# Altium footprint library CANable.PcbLib: 23 footprints (part 1 of 2)
Each footprint in its own frame and in the unit in brackets; x right, y up, seen from the top. Pads: shape width x height; smd on the part's side, far side on the other; paste and mask are expansions set on the pad; w line width, h text height; cw(c..) or ccw(c..) is an arc to the next point about the centre after c.
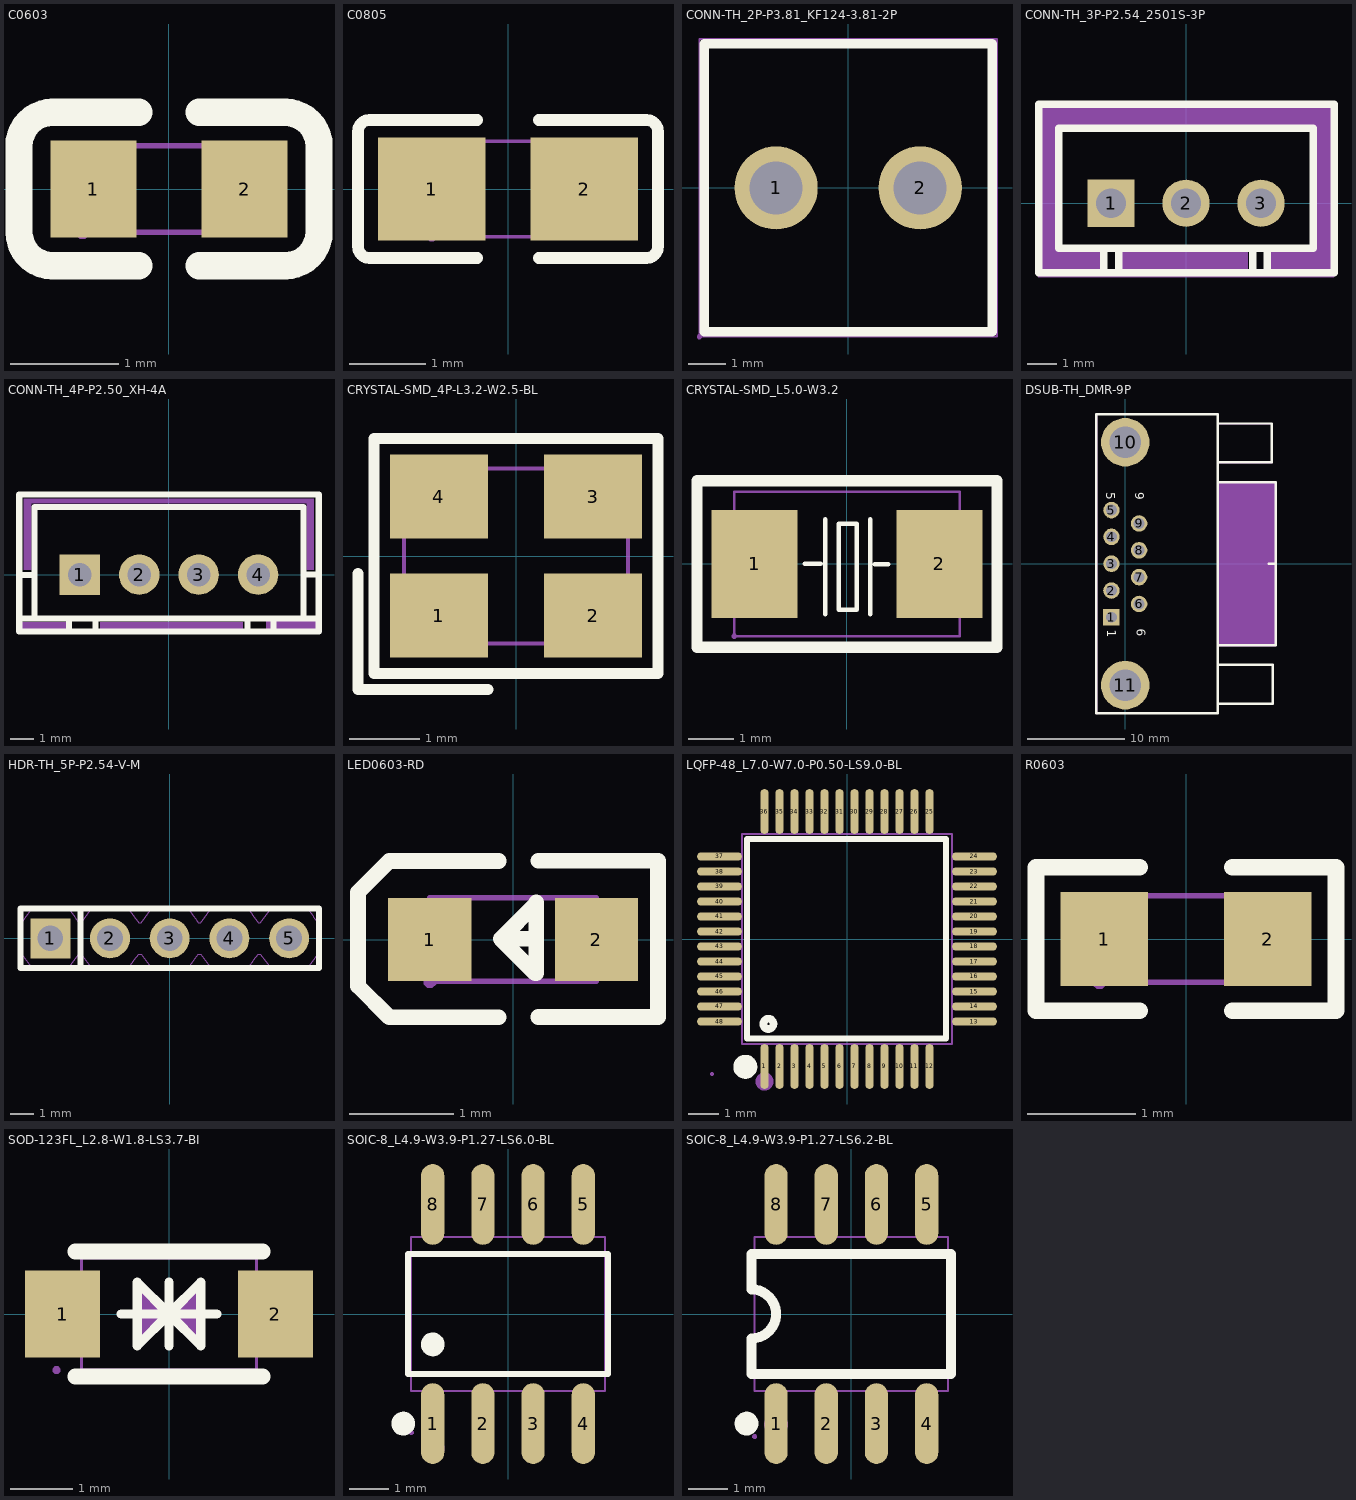
[diagram p0: the footprints below, top view; thin cyan lines are the x and y axes]

## C0603 [mm]
pads (2):
  rect 0.8x0.9 smd: 1(-0.7,0) 2(0.7,0)
Top Overlay:
  lines w0.254: -1.08,-0.71 -0.28,-0.71 ; -1.08,0.71 -0.28,0.71 ; -1.08,-0.71 cw(c-1.08,-0.4) -1.39,-0.4 -1.39,0.4 cw(c-1.08,0.4) -1.08,0.71 ; 0.28,-0.71 1.08,-0.71 ccw(c1.08,-0.4) 1.39,-0.4 1.39,0.4 ccw(c1.08,0.4) 1.08,0.71 0.28,0.71
Mechanical 15:
  region: 0.8,-0.4 0.8,0.4 0.5,0.4 0.5,-0.4
  region: -0.8,-0.4 -0.8,0.4 -0.5,0.4 -0.5,-0.4
  region: -0.74,-0.4 -0.74,-0.425 -0.775,-0.46 -0.825,-0.46 -0.86,-0.425 -0.86,-0.4 -0.86,-0.375 -0.825,-0.34 -0.775,-0.34 -0.74,-0.375
  lines w0.051: -0.8,-0.4 0.8,-0.4 0.8,0.4 -0.8,0.4 -0.8,-0.4

## C0805 [mm]
pads (2):
  rect 1.41x1.35 smd paste-100 mask+0.051: 1(-1,0) 2(1,0)
Top Overlay:
  lines w0.152: -0.401,-0.904 -1.811,-0.904 cw(c-1.811,-0.751) -1.964,-0.751 -1.964,0.751 cw(c-1.811,0.751) -1.811,0.904 -0.401,0.904 ; 0.401,-0.904 1.811,-0.904 ccw(c1.811,-0.751) 1.964,-0.751 1.964,0.751 ccw(c1.811,0.751) 1.811,0.904 0.401,0.904
Top Paste:
  region: 1.705,0.64 1.705,-0.64 1.655,-0.69 0.505,-0.69 0.455,-0.64 0.45,-0.23 0.9,-0.23 0.9,0.22 0.46,0.22 0.455,0.64 0.505,0.69 1.655,0.69
  region: -1.705,-0.64 -1.705,0.64 -1.655,0.69 -0.505,0.69 -0.455,0.64 -0.45,0.23 -0.9,0.23 -0.9,-0.22 -0.46,-0.22 -0.455,-0.64 -0.505,-0.69 -1.655,-0.69
Mechanical 15:
  region: 1,0.625 1,-0.625 0.5,-0.625 0.5,0.625
  region: -1,-0.625 -1,0.625 -0.5,0.625 -0.5,-0.625
  region: -0.94,-0.625 -0.94,-0.65 -0.975,-0.685 -1.025,-0.685 -1.06,-0.65 -1.06,-0.625 -1.06,-0.6 -1.025,-0.565 -0.975,-0.565 -0.94,-0.6
  lines w0.051: -1,-0.625 1,-0.625 1,0.625 -1,0.625 -1,-0.625

## CONN-TH_2P-P3.81_KF124-3.81-2P [mm]
pads (2):
  round 2.2 hole 1.4: 1(-1.905,0) 2(1.905,0)
Top Overlay:
  lines w0.254: -3.81,-3.81 3.81,-3.81 3.81,3.81 -3.81,3.81 -3.81,-3.81
Mechanical 15:
  region: -3.877,-3.937 -3.877,-3.962 -3.912,-3.997 -3.962,-3.997 -3.997,-3.962 -3.997,-3.937 -3.997,-3.912 -3.962,-3.877 -3.912,-3.877 -3.877,-3.912
  region: -1.305,0 -1.305,-0.119 -1.396,-0.34 -1.565,-0.509 -1.786,-0.6 -2.024,-0.6 -2.245,-0.509 -2.414,-0.34 -2.505,-0.119 -2.505,0 -2.505,0.119 -2.414,0.34 -2.245,0.509 -2.024,0.6 -1.786,0.6 -1.565,0.509 -1.396,0.34 -1.305,0.119
  region: 2.505,0 2.505,-0.119 2.414,-0.34 2.245,-0.509 2.024,-0.6 1.786,-0.6 1.565,-0.509 1.396,-0.34 1.305,-0.119 1.305,0 1.305,0.119 1.396,0.34 1.565,0.509 1.786,0.6 2.024,0.6 2.245,0.509 2.414,0.34 2.505,0.119
  lines w0.051: -3.937,-3.937 -3.937,3.937 3.937,3.937 3.937,-3.937 -3.937,-3.937

## CONN-TH_3P-P2.54_2501S-3P [mm]
pads (3):
  rect 1.6x1.6 hole 1: 1(-2.54,0)
  round 1.6 hole 1: 2(0,0) 3(2.54,0)
Top Overlay:
  lines w0.254: -2.794,-2.35 -2.794,-1.524 ; -2.279,-2.35 -2.279,-1.524 ; 2.268,-2.35 2.268,-1.524 ; 2.751,-2.35 2.751,-1.524 ; -4.98,-2.35 -4.98,3.35 5.02,3.35 5.02,-2.35 -4.98,-2.35 ; -4.318,-1.524 4.318,-1.524 4.318,2.54 -4.318,2.54 -4.318,-1.524
Mechanical 6:
  region: -2.22,-2.3 2.098,-2.3 2.098,-1.538 -2.22,-1.538
  region: 2.794,-2.286 2.794,-1.524 4.318,-1.524 4.318,2.54 -4.318,2.54 -4.318,-1.524 -2.794,-1.524 -2.794,-2.286 -5.08,-2.286 -5.08,3.302 5.08,3.302 5.08,-2.286
Mechanical 15:
  region: 2.215,0.325 2.865,0.325 2.865,-0.325 2.215,-0.325
  region: -0.325,0.325 0.325,0.325 0.325,-0.325 -0.325,-0.325
  region: -2.865,0.325 -2.215,0.325 -2.215,-0.325 -2.865,-0.325
  region: -4.94,3.4 -4.94,3.375 -4.975,3.34 -5.025,3.34 -5.06,3.375 -5.06,3.4 -5.06,3.425 -5.025,3.46 -4.975,3.46 -4.94,3.425
  lines w0.051: -5,-2.5 -5,3.4 5,3.4 5,-2.5 -5,-2.5

## CONN-TH_4P-P2.50_XH-4A [mm]
pads (4):
  rect 1.7x1.7 hole 1: 1(-3.75,0)
  round 1.7 hole 1: 2(-1.25,0) 3(1.25,0) 4(3.75,0)
Top Overlay:
  lines w0.254: -6.3,-1.815 -6.265,-1.85 -6.011,-1.85 -5.7,-1.85 ; -6.3,-0.007 -5.7,-0.007 ; -4.2,-2.4 -4.2,-1.9 ; -3.1,-2.4 -3.1,-1.9 ; 3.301,-2.4 3.301,-1.9 ; 4.401,-2.4 4.401,-1.9 ; 5.7,0 6.3,0 ; 5.711,-1.815 5.745,-1.85 6.311,-1.85 ; -6.3,-2.4 6.3,-2.4 6.3,3.378 -6.163,3.378 -6.3,3.378 -6.3,-2.4 ; -5.65,-1.85 -5.65,2.85 5.65,2.85 5.65,-1.85 -5.65,-1.85
Mechanical 6:
  region: 4.092,-1.916 6.192,-1.916 6.192,-2.316 4.092,-2.316
  region: -6.3,-2 -4.2,-2 -4.2,-2.4 -6.3,-2.4
  region: -2.9,-2 3.1,-2 3.1,-2.4 -2.9,-2.4
  region: -6.1,0.2 -5.8,0.2 -5.8,3 5.8,3 5.8,0.2 6.1,0.2 6.1,3.2 -6.1,3.2
Mechanical 15:
  region: -4.07,0.32 -3.43,0.32 -3.43,-0.32 -4.07,-0.32
  region: -1.57,0.32 -0.93,0.32 -0.93,-0.32 -1.57,-0.32
  region: 0.93,0.32 1.57,0.32 1.57,-0.32 0.93,-0.32
  region: 3.43,0.32 4.07,0.32 4.07,-0.32 3.43,-0.32
  region: -6.19,-2.422 -6.19,-2.447 -6.225,-2.482 -6.275,-2.482 -6.31,-2.447 -6.31,-2.422 -6.31,-2.397 -6.275,-2.362 -6.225,-2.362 -6.19,-2.397
  lines w0.051: -6.25,-2.422 6.25,-2.422 6.25,3.378 -6.25,3.378 -6.25,-2.422

## CRYSTAL-SMD_4P-L3.2-W2.5-BL [mm]
pads (4):
  rect 1.4x1.2 smd: 1(-1.1,-0.85) 2(1.1,-0.85) 3(1.1,0.85) 4(-1.1,0.85)
Top Overlay:
  lines w0.152: -2.257,-0.25 -2.257,-1.907 -0.4,-1.907 ; -2.029,-1.678 2.029,-1.678 2.029,1.679 -2.029,1.679 -2.029,-1.678
Mechanical 6:
  circle w0.254: c-1.27,-0.889 r0.127
Mechanical 15:
  region: -1.5,-0.35 -0.6,-0.35 -0.6,-1.15 -1.5,-1.15
  region: 0.6,-0.35 1.5,-0.35 1.5,-1.15 0.6,-1.15
  region: 0.6,1.15 1.5,1.15 1.5,0.35 0.6,0.35
  region: -1.5,1.15 -0.6,1.15 -0.6,0.35 -1.5,0.35
  region: -1.54,-1.25 -1.54,-1.275 -1.575,-1.31 -1.625,-1.31 -1.66,-1.275 -1.66,-1.25 -1.66,-1.225 -1.625,-1.19 -1.575,-1.19 -1.54,-1.225
  lines w0.051: -1.6,-1.25 1.6,-1.25 1.6,1.25 -1.6,1.25 -1.6,-1.25

## CRYSTAL-SMD_L5.0-W3.2 [mm]
pads (2):
  rect 1.9x2.4 smd: 1(-2.05,0) 2(2.05,0)
Top Overlay:
  lines w0.1: -0.94,0 -0.584,0 ; -0.483,-1.109 -0.483,0.991 ; 0.517,-1.109 0.517,0.991 ; 0.617,-0.009 0.917,-0.009 ; -0.183,-1.009 -0.183,0.89 0.217,0.89 0.217,-1.009 -0.183,-1.009
  lines w0.254: -3.325,-1.85 3.325,-1.85 3.325,-0.7 3.325,0.7 3.325,1.85 -3.325,1.85 -3.325,0.7 -3.325,-0.7 -3.325,-1.85
Mechanical 15:
  region: -2.44,-1.6 -2.44,-1.625 -2.475,-1.66 -2.525,-1.66 -2.56,-1.625 -2.56,-1.6 -2.56,-1.575 -2.525,-1.54 -2.475,-1.54 -2.44,-1.575
  region: -2.4,1 -1.3,1 -1.3,-1 -2.4,-1
  region: 1.3,1 2.4,1 2.4,-1 1.3,-1
  lines w0.051: -2.5,-1.6 -2.5,1.6 2.5,1.6 2.5,-1.6 -2.5,-1.6

## DSUB-TH_DMR-9P [mm]
pads (11):
  rect 1.7x1.7 hole 1.1: 1(-1.42,-5.52)
  round 1.7 hole 1.1: 2(-1.42,-2.76) 3(-1.42,0) 4(-1.42,2.76) 5(-1.42,5.52) 6(1.42,-4.14) 7(1.42,-1.38) 8(1.42,1.38) 9(1.42,4.14)
  round 5 hole 3.25: 10(0,12.5) 11(0,-12.5)
Top Overlay:
  lines w0.254: 9.5,-14.4 15.2,-14.4 15.2,-10.4 9.5,-10.4 ; 9.5,-8.38 15.5,-8.38 15.5,8.37 9.5,8.37 ; 9.5,10.43 15.058,10.43 ; 9.5,14.57 9.5,14.428 15.076,14.428 15.076,10.46 ; 14.78,-0.005 15.48,-0.005 ; -3,-15.4 -3,15.4 9.5,15.4 9.5,14.621 9.5,-15.4 -3,-15.4
  text "9" at 1.018,7.374 h0.89
  text "6" at 1.171,-6.698 h0.89
  text "1" at -1.877,-6.799 h0.89
  text "5" at -1.979,7.349 h0.89
Mechanical 6:
  region: 9.5,8.4 15.5,8.4 15.5,-8.4 9.5,-8.4
Mechanical 15:
  drawing of 29 lines, arcs and shapes, not listed

## HDR-TH_5P-P2.54-V-M [mm]
pads (5):
  rect 1.7x1.7 hole 1.1: 1(-5.08,0)
  round 1.7 hole 1.1: 2(-2.54,0) 3(0,0) 4(2.54,0) 5(5.08,0)
Top Overlay:
  lines w0.254: -3.786,-1.27 -3.786,1.27 ; -6.35,-1.27 6.35,-1.27 6.35,1.27 -6.35,1.27 -6.35,-1.27
Mechanical 15:
  region: -6.29,-1.271 -6.29,-1.296 -6.325,-1.331 -6.375,-1.331 -6.41,-1.296 -6.41,-1.271 -6.41,-1.246 -6.375,-1.211 -6.325,-1.211 -6.29,-1.246
  region: 4.76,0.32 5.4,0.32 5.4,-0.32 4.76,-0.32
  region: 2.22,0.32 2.86,0.32 2.86,-0.32 2.22,-0.32
  region: -0.32,0.32 0.32,0.32 0.32,-0.32 -0.32,-0.32
  region: -2.86,0.32 -2.22,0.32 -2.22,-0.32 -2.86,-0.32
  region: -5.4,0.32 -4.76,0.32 -4.76,-0.32 -5.4,-0.32
  lines w0.051: -6.35,-0.67 -6.35,0.67 -6.299,0.67 -6.028,1.032 -5.85,1.27 -4.31,1.27 -4.149,1.059 -4.048,0.925 -4.017,0.884 -3.86,0.67 -3.76,0.67 -3.31,1.27 -1.77,1.27 -1.631,1.088 -1.546,0.976 -1.459,0.859 -1.436,0.827 -1.417,0.801 -1.32,0.67 -1.22,0.67 -0.77,1.27 0.77,1.27 0.867,1.143 1.01,0.955 1.108,0.822 1.136,0.783 1.22,0.67 1.32,0.67 1.77,1.27 3.31,1.27 3.458,1.076 3.533,0.979 3.76,0.67 3.86,0.67 4.311,1.27 5.85,1.27 6.079,0.97 6.112,0.925 6.3,0.67 6.35,0.67 6.35,-0.67 6.3,-0.67 6.075,-0.976 5.85,-1.27 4.31,-1.27 3.86,-0.67 3.759,-0.67 3.581,-0.913 3.545,-0.963 3.51,-1.009 3.31,-1.271 1.77,-1.27 1.32,-0.67 1.22,-0.67 1.02,-0.942 0.992,-0.98 0.77,-1.27 -0.77,-1.27 -1.22,-0.67 -1.32,-0.67 -1.503,-0.919 -1.542,-0.972 -1.77,-1.27 -3.31,-1.27 -3.76,-0.67 -3.86,-0.67 -4.077,-0.965 -4.31,-1.27 -5.85,-1.27 -6.3,-0.67 -6.35,-0.67 -6.35,-0.67 ; -6.35,-0.67 -6.35,-0.67

## LED0603-RD [mm]
pads (2):
  rect 0.8x0.8 smd: 1(-0.799,0) 2(0.799,0)
Top Overlay:
  lines w0.15: -0.14,-0.746 -1.19,-0.746 -1.49,-0.446 -1.49,-0.346 -1.49,0.354 -1.49,0.454 -1.19,0.754 -0.14,0.754 ; 0.22,0.007 -0.12,0.007 ; 0.24,-0.744 1.39,-0.744 ; 0.24,0.757 1.39,0.757 1.39,-0.723 ; -0.12,0.007 0.21,-0.324 0.22,-0.324 0.22,0.357 0.22,0.347 -0.12,0.007
Mechanical 6:
  region: -1.07,0.062 -0.53,0.062 -0.53,-0.068 -1.07,-0.068
  region: 0.735,-0.267 0.735,0.273 0.865,0.273 0.865,-0.267
  region: 0.529,0.068 1.069,0.068 1.069,-0.062 0.529,-0.062
Mechanical 15:
  region: -0.739,-0.403 -0.739,-0.428 -0.775,-0.463 -0.824,-0.463 -0.859,-0.428 -0.859,-0.403 -0.859,-0.379 -0.824,-0.344 -0.775,-0.344 -0.739,-0.379
  region: -0.8,-0.403 -0.8,0.397 -0.5,0.397 -0.5,-0.403
  region: 0.5,-0.396 0.5,0.404 0.8,0.404 0.8,-0.396
  lines w0.051: -0.8,-0.4 -0.8,0.4 0.8,0.4 0.8,-0.4 -0.8,-0.4

## LQFP-48_L7.0-W7.0-P0.50-LS9.0-BL [mm]
pads (48):
  oval 0.27x1.5 smd paste+0 mask+0.05: 1(-2.75,-4.25) 2(-2.25,-4.25) 3(-1.75,-4.25) 4(-1.25,-4.25) 5(-0.75,-4.25) 6(-0.25,-4.25) 7(0.25,-4.25) 8(0.75,-4.25) 9(1.25,-4.25) 10(1.75,-4.25) 11(2.25,-4.25) 12(2.75,-4.25) 25(2.75,4.25) 26(2.25,4.25) 27(1.75,4.25) 28(1.25,4.25) 29(0.75,4.25) 30(0.25,4.25) 31(-0.25,4.25) 32(-0.75,4.25) 33(-1.25,4.25) 34(-1.75,4.25) 35(-2.25,4.25) 36(-2.75,4.25)
  oval 1.5x0.27 smd paste+0 mask+0.05: 13(4.25,-2.75) 14(4.25,-2.25) 15(4.25,-1.75) 16(4.25,-1.25) 17(4.25,-0.75) 18(4.25,-0.25) 19(4.25,0.25) 20(4.25,0.75) 21(4.25,1.25) 22(4.25,1.75) 23(4.25,2.25) 24(4.25,2.75) 37(-4.25,2.75) 38(-4.25,2.25) 39(-4.25,1.75) 40(-4.25,1.25) 41(-4.25,0.75) 42(-4.25,0.25) 43(-4.25,-0.25) 44(-4.25,-0.75) 45(-4.25,-1.25) 46(-4.25,-1.75) 47(-4.25,-2.25) 48(-4.25,-2.75)
Top Overlay:
  circle w0.254: c-2.62,-2.83 r0.17
  lines w0.2: -2.896,3.34 3.302,3.34 3.302,-3.315 -3.327,-3.315 -3.327,3.34 -2.565,3.34
  lines w0.4: -3.39,-4.06 ccw(c-3.389,-4.26) -3.389,-4.46 ccw(c-3.389,-4.26) -3.387,-4.06
Mechanical 6:
  circle w0.3: c-2.75,-4.75 r0.15
Mechanical 15:
  drawing of 101 lines, arcs and shapes, not listed

## PCBComponent_1 [mm]

## R0603 [mm]
pads (2):
  rect 0.806x0.864 smd paste-100 mask+0.051: 1(-0.753,0) 2(0.753,0)
Top Overlay:
  lines w0.152: -0.426,-0.661 -1.385,-0.661 -1.385,0.661 -0.426,0.661 ; 0.426,-0.661 1.385,-0.661 1.385,0.661 0.426,0.661
Top Paste:
  region: 1.195,0.45 0.395,0.45 0.345,0.4 0.345,0.172 0.715,0.172 0.715,-0.158 0.345,-0.158 0.345,-0.4 0.395,-0.45 1.195,-0.45 1.245,-0.4 1.245,0.4
  region: -1.195,-0.45 -0.395,-0.45 -0.345,-0.4 -0.345,-0.172 -0.715,-0.172 -0.715,0.158 -0.345,0.158 -0.345,0.4 -0.395,0.45 -1.195,0.45 -1.245,0.4 -1.245,-0.4
Mechanical 15:
  region: -0.74,-0.4 -0.74,-0.425 -0.775,-0.46 -0.825,-0.46 -0.86,-0.425 -0.86,-0.4 -0.86,-0.375 -0.825,-0.34 -0.775,-0.34 -0.74,-0.375
  region: -0.8,-0.4 -0.8,0.4 -0.5,0.4 -0.5,-0.4
  region: 0.8,-0.4 0.8,0.4 0.5,0.4 0.5,-0.4
  lines w0.051: -0.8,-0.4 -0.8,0.4 0.8,0.4 0.8,-0.4 -0.8,-0.4

## SOD-123FL_L2.8-W1.8-LS3.7-BI [mm]
pads (2):
  rect 1.2x1.4 smd: 1(-1.7,0) 2(1.7,0)
Top Overlay:
  lines w0.15: -0.762,0 0.762,0 ; 0,-0.508 0,0.508 ; 0,-0.254 0,0.254 ; 0,0 0.508,0.508 0.508,-0.508 0,0 ; 0,0 -0.508,-0.508 -0.508,0.508 0,0
  lines w0.254: -1.5,-1 1.5,-1 ; -1.5,1 1.5,1
Mechanical 6:
  region: -0.5,0.5 -0.5,-0.5 0,0
  region: 0.5,-0.5 0.5,0.5 0,0
Mechanical 15:
  region: -1.8,0.5 -1.275,0.5 -1.275,-0.5 -1.8,-0.5
  region: 1.275,0.5 1.8,0.5 1.8,-0.5 1.275,-0.5
  region: -1.74,-0.9 -1.74,-0.925 -1.775,-0.96 -1.825,-0.96 -1.86,-0.925 -1.86,-0.9 -1.86,-0.875 -1.825,-0.84 -1.775,-0.84 -1.74,-0.875
  lines w0.051: -1.4,-0.9 1.4,-0.9 1.4,0.9 -1.4,0.9 -1.4,-0.9

## SOIC-8_L4.9-W3.9-P1.27-LS6.0-BL [mm]
pads (8):
  oval 0.588x2.045 smd: 1(-1.905,-2.772) 2(-0.635,-2.772) 3(0.635,-2.772) 4(1.905,-2.772) 5(1.905,2.772) 6(0.635,2.772) 7(-0.635,2.772) 8(-1.905,2.772)
Top Overlay:
  circle w0.3: c-1.905,-0.769 r0.15
  circle w0.3: c-2.652,-2.772 r0.15
  lines w0.152: -2.526,-1.521 -2.526,1.521 2.526,1.521 2.526,-1.521 -2.526,-1.521
Mechanical 6:
  circle w0.3: c-1.905,-3.4 r0.15
Mechanical 15:
  region: -2.39,-3 -2.39,-3.025 -2.425,-3.06 -2.475,-3.06 -2.51,-3.025 -2.51,-3 -2.51,-2.975 -2.475,-2.94 -2.425,-2.94 -2.39,-2.975 -2.39,-3
  region: -2.115,-3 -2.115,-2.165 -1.695,-2.165 -1.695,-3
  region: -2.115,-2.175 -2.115,-1.94 -1.695,-1.94 -1.695,-2.175
  region: -0.845,-3 -0.845,-2.165 -0.425,-2.165 -0.425,-3
  region: -0.845,-2.175 -0.845,-1.94 -0.425,-1.94 -0.425,-2.175
  region: 0.425,-3 0.425,-2.165 0.845,-2.165 0.845,-3
  region: 0.425,-2.175 0.425,-1.94 0.845,-1.94 0.845,-2.175
  region: 1.695,-3 1.695,-2.165 2.115,-2.165 2.115,-3
  region: 1.695,-2.175 1.695,-1.94 2.115,-1.94 2.115,-2.175
  region: -2.115,3 -2.115,2.165 -1.695,2.165 -1.695,3
  region: -2.115,2.175 -2.115,1.94 -1.695,1.94 -1.695,2.175
  region: -0.845,3 -0.845,2.165 -0.425,2.165 -0.425,3
  region: -0.845,2.175 -0.845,1.94 -0.425,1.94 -0.425,2.175
  region: 0.425,3 0.425,2.165 0.845,2.165 0.845,3
  region: 0.425,2.175 0.425,1.94 0.845,1.94 0.845,2.175
  region: 1.695,3 1.695,2.165 2.115,2.165 2.115,3
  region: 1.695,2.175 1.695,1.94 2.115,1.94 2.115,2.175
  lines w0.051: -2.45,-1.95 -2.45,1.95 2.45,1.95 2.45,-1.95 -2.45,-1.95

## SOIC-8_L4.9-W3.9-P1.27-LS6.2-BL [mm]
pads (8):
  oval 0.588x2.045 smd: 1(-1.905,-2.772) 2(-0.635,-2.772) 3(0.635,-2.772) 4(1.905,-2.772) 5(1.905,2.772) 6(0.635,2.772) 7(-0.635,2.772) 8(-1.905,2.772)
Top Overlay:
  circle w0.3: c-2.652,-2.772 r0.15
  lines w0.254: -2.526,0.621 -2.526,1.521 -1.917,1.521 ; -2.527,0.623 cw(c-2.526,0.001) -2.526,-0.621 -2.526,-1.521 -1.917,-1.521 ; -1.894,-1.521 -0.647,-1.521 ; -1.894,1.521 -0.647,1.521 ; -0.624,-1.521 0.623,-1.521 ; -0.624,1.521 0.623,1.521 ; 0.646,-1.521 1.893,-1.521 ; 0.646,1.521 1.893,1.521 ; 1.916,-1.521 2.526,-1.521 2.526,1.521 1.916,1.521
Mechanical 6:
  circle w0.3: c-1.905,-2.794 r0.15
Mechanical 15:
  region: 1.705,2.275 1.705,3.1 2.105,3.1 2.105,2.275
  region: 1.705,1.94 1.705,2.285 2.105,2.285 2.105,1.94
  region: 0.435,2.275 0.435,3.1 0.835,3.1 0.835,2.275
  region: 0.435,1.94 0.435,2.285 0.835,2.285 0.835,1.94
  region: -0.835,2.275 -0.835,3.1 -0.435,3.1 -0.435,2.275
  region: -0.835,1.94 -0.835,2.285 -0.435,2.285 -0.435,1.94
  region: -2.105,2.275 -2.105,3.1 -1.705,3.1 -1.705,2.275
  region: -2.105,1.94 -2.105,2.285 -1.705,2.285 -1.705,1.94
  region: 1.705,-3.1 1.705,-2.275 2.105,-2.275 2.105,-3.1
  region: 1.705,-2.285 1.705,-1.94 2.105,-1.94 2.105,-2.285
  region: 0.435,-3.1 0.435,-2.275 0.835,-2.275 0.835,-3.1
  region: 0.435,-2.285 0.435,-1.94 0.835,-1.94 0.835,-2.285
  region: -0.835,-3.1 -0.835,-2.275 -0.435,-2.275 -0.435,-3.1
  region: -0.835,-2.285 -0.835,-1.94 -0.435,-1.94 -0.435,-2.285
  region: -2.105,-3.1 -2.105,-2.275 -1.705,-2.275 -1.705,-3.1
  region: -2.105,-2.285 -2.105,-1.94 -1.705,-1.94 -1.705,-2.285
  region: -2.39,-3.1 -2.39,-3.125 -2.425,-3.16 -2.475,-3.16 -2.51,-3.125 -2.51,-3.1 -2.51,-3.075 -2.475,-3.04 -2.425,-3.04 -2.39,-3.075
  lines w0.051: -2.45,-1.95 2.45,-1.95 2.45,1.95 -2.45,1.95 -2.45,-1.95